# Altium integrated library FA-T220-38E.IntLib: 1 symbol
Pins are listed as number, name and electrical type; pins without a type are passive.

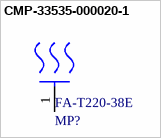
[diagram p0: symbol CMP-33535-000020-1]

## CMP-33535-000020-1
designator MP?, comment FA-T220-38E
HEATSINK TO-218,TO-220,TO-247; Natural Thermal Resistance: 3.8°C/W; Shape: Fins; Thermal Resistance @ Forced Air Flow (100 LFM): 1.5°C/W; Finish: Anodized; Width: 25mm; Length: 41.6mm; Material: Aluminium; Case/Package: TO-220; Height: 38.1mm; Packaging: Bulk; Height Off Base: 0.984inch; Series: F; Mount: Bolt; Weight: 27g; RoHS Compliant: Yes; Type: Passive; Package Cooled: TO-220; Color: Black; Package Quantity: 10
footprint FP-FA-T220-38E-MFG
pins: 1 MNT 1